# Altium footprint library PcbLib2.PcbLib: 6 footprints
Each footprint in its own frame and in the unit in brackets; x right, y up, seen from the top. Pads: shape width x height; smd on the part's side, far side on the other; paste and mask are expansions set on the pad; w line width, h text height; cw(c..) or ccw(c..) is an arc to the next point about the centre after c.
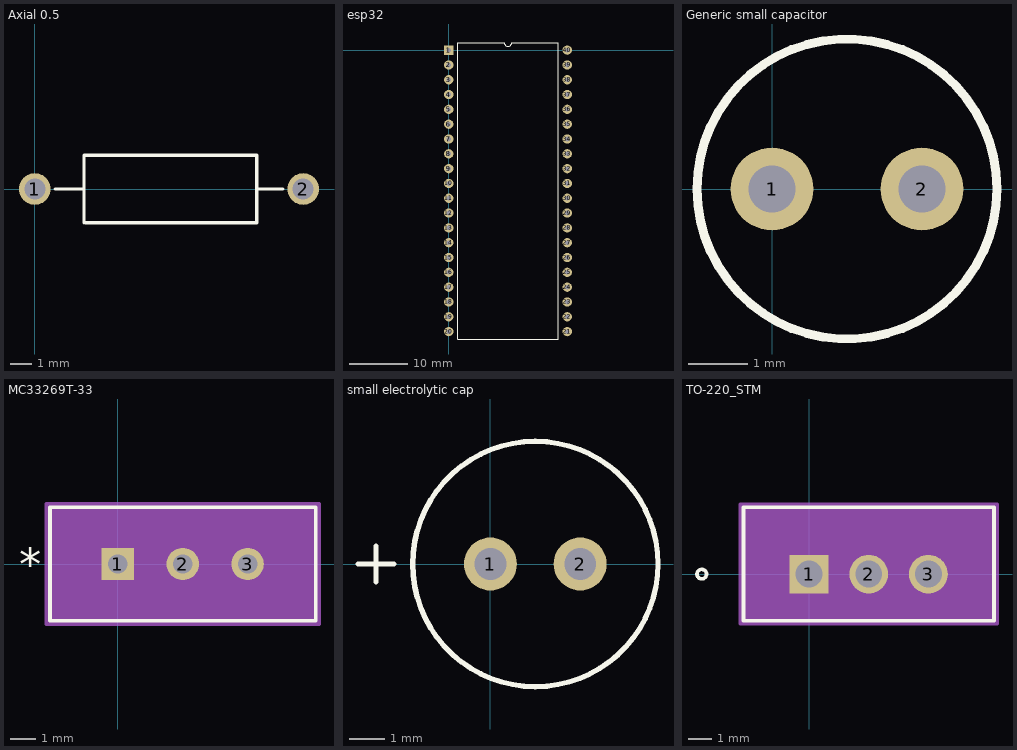
[diagram p0: the footprints below, top view; thin cyan lines are the x and y axes]

## Axial 0.5 [mm]
pads (2):
  round 1.5 hole 1: 1(0,0) 2(12.7,0)
Top Overlay:
  lines w0.15: 0.95,0 2.325,0 ; 2.325,-1.6 2.325,0 ; 2.4,-1.6 10.5,-1.6 10.5,1.6 2.325,1.6 2.325,0 ; 10.525,0 11.75,0

## esp32 [mm]
pads (40):
  rect 1.6x1.6 hole 0.8: 1(0,0)
  round 1.6 hole 0.8: 2(0,-2.54) 3(0,-5.08) 4(0,-7.62) 5(0,-10.16) 6(0,-12.7) 7(0,-15.24) 8(0,-17.78) 9(0,-20.32) 10(0,-22.86) 11(0,-25.4) 12(0,-27.94) 13(0,-30.48) 14(0,-33.02) 15(0,-35.56) 16(0,-38.1) 17(0,-40.64) 18(0,-43.18) 19(0,-45.72) 20(0,-48.26) 21(20.32,-48.26) 22(20.32,-45.72) 23(20.32,-43.18) 24(20.32,-40.64) 25(20.32,-38.1) 26(20.32,-35.56) 27(20.32,-33.02) 28(20.32,-30.48) 29(20.32,-27.94) 30(20.32,-25.4) 31(20.32,-22.86) 32(20.32,-20.32) 33(20.32,-17.78) 34(20.32,-15.24) 35(20.32,-12.7) 36(20.32,-10.16) 37(20.32,-7.62) 38(20.32,-5.08) 39(20.32,-2.54) 40(20.32,0)
Top Overlay:
  lines w0.15: 1.585,-49.53 18.735,-49.53 18.735,1.27 10.795,1.27 cw(c10.16,1.27) 9.525,1.27 1.585,1.27 1.585,-49.53

## Generic small capacitor [mm]
pads (2):
  round 1.4 / inner round 1.4 / far side round 1.2 hole 0.8: 1(0,0) 2(2.54,0)
Top Overlay:
  circle w0.15: c1.27,0 r2.54

## MC33269T-33 [mil]
pads (3):
  rect 50x50 / inner round 60 / far side rect 50x50 hole 30 paste-99999 mask+0: 1(0,0)
  round 50 / inner round 60 / far side round 50 hole 30 paste-99999 mask+0: 2(100,0) 3(200,0)
Top Overlay:
  lines w6: -105,-87.5 305,-87.5 305,87.5 -105,87.5 -105,-87.5
  text "*" at -152.5,-25 h50
Mechanical 13:
  lines w1: -100,-82.5 300,-82.5 300,82.5 -100,82.5 -100,-82.5
  text "*" at -102.5,-25 h50
Mechanical 15:
  region: 310,-92.5 -110,-92.5 -110,92.5 310,92.5
  lines w6: -110,-92.5 -110,92.5 310,92.5 310,-92.5 -110,-92.5
3D body "TO220-3_ONS.step": height 625, standoff -380, extent -100,-82.52 300,82.52

## small electrolytic cap [mm]
pads (2):
  round 1.5 hole 0.9: 1(0,0) 2(2.54,0)
Top Overlay:
  circle w0.15: c1.27,0 r3.47
  lines w0.15: -3.745,0 -2.729,0 ; -3.237,-0.508 -3.237,0.508

## TO-220_STM [mil]
pads (3):
  rect 65x65 hole 45 paste-99999 mask-32.5: 1(0,0)
  round 65 hole 45 paste-99999 mask-32.5: 2(100,0) 3(200,0)
Top Overlay:
  circle w6: c-180,0 r8
  lines w6: -110,-78.5 310,-78.5 310,112.5 -110,112.5 -110,-78.5
Mechanical 13:
  circle w1: c-85,0 r8
  lines w1: -105,-73.5 305,-73.5 305,107.5 -105,107.5 -105,-73.5
  lines w6: -10,0 10,0 ; 0,-10 0,10
Mechanical 15:
  region: 315,-83.5 -115,-83.5 -115,117.5 315,117.5
  lines w6: -115,-83.5 -115,117.5 315,117.5 315,-83.5 -115,-83.5
3D body "TO-220_STM.step": height 775.98, standoff -255, extent -105,-73.5 305,107.52